# Altium footprint library WE-SHCA.PcbLib: 44 footprints (part 2 of 3)
Each footprint in its own frame and in the unit in brackets; x right, y up, seen from the top. Pads: shape width x height; smd on the part's side, far side on the other; paste and mask are expansions set on the pad; w line width, h text height; cw(c..) or ccw(c..) is an arc to the next point about the centre after c.
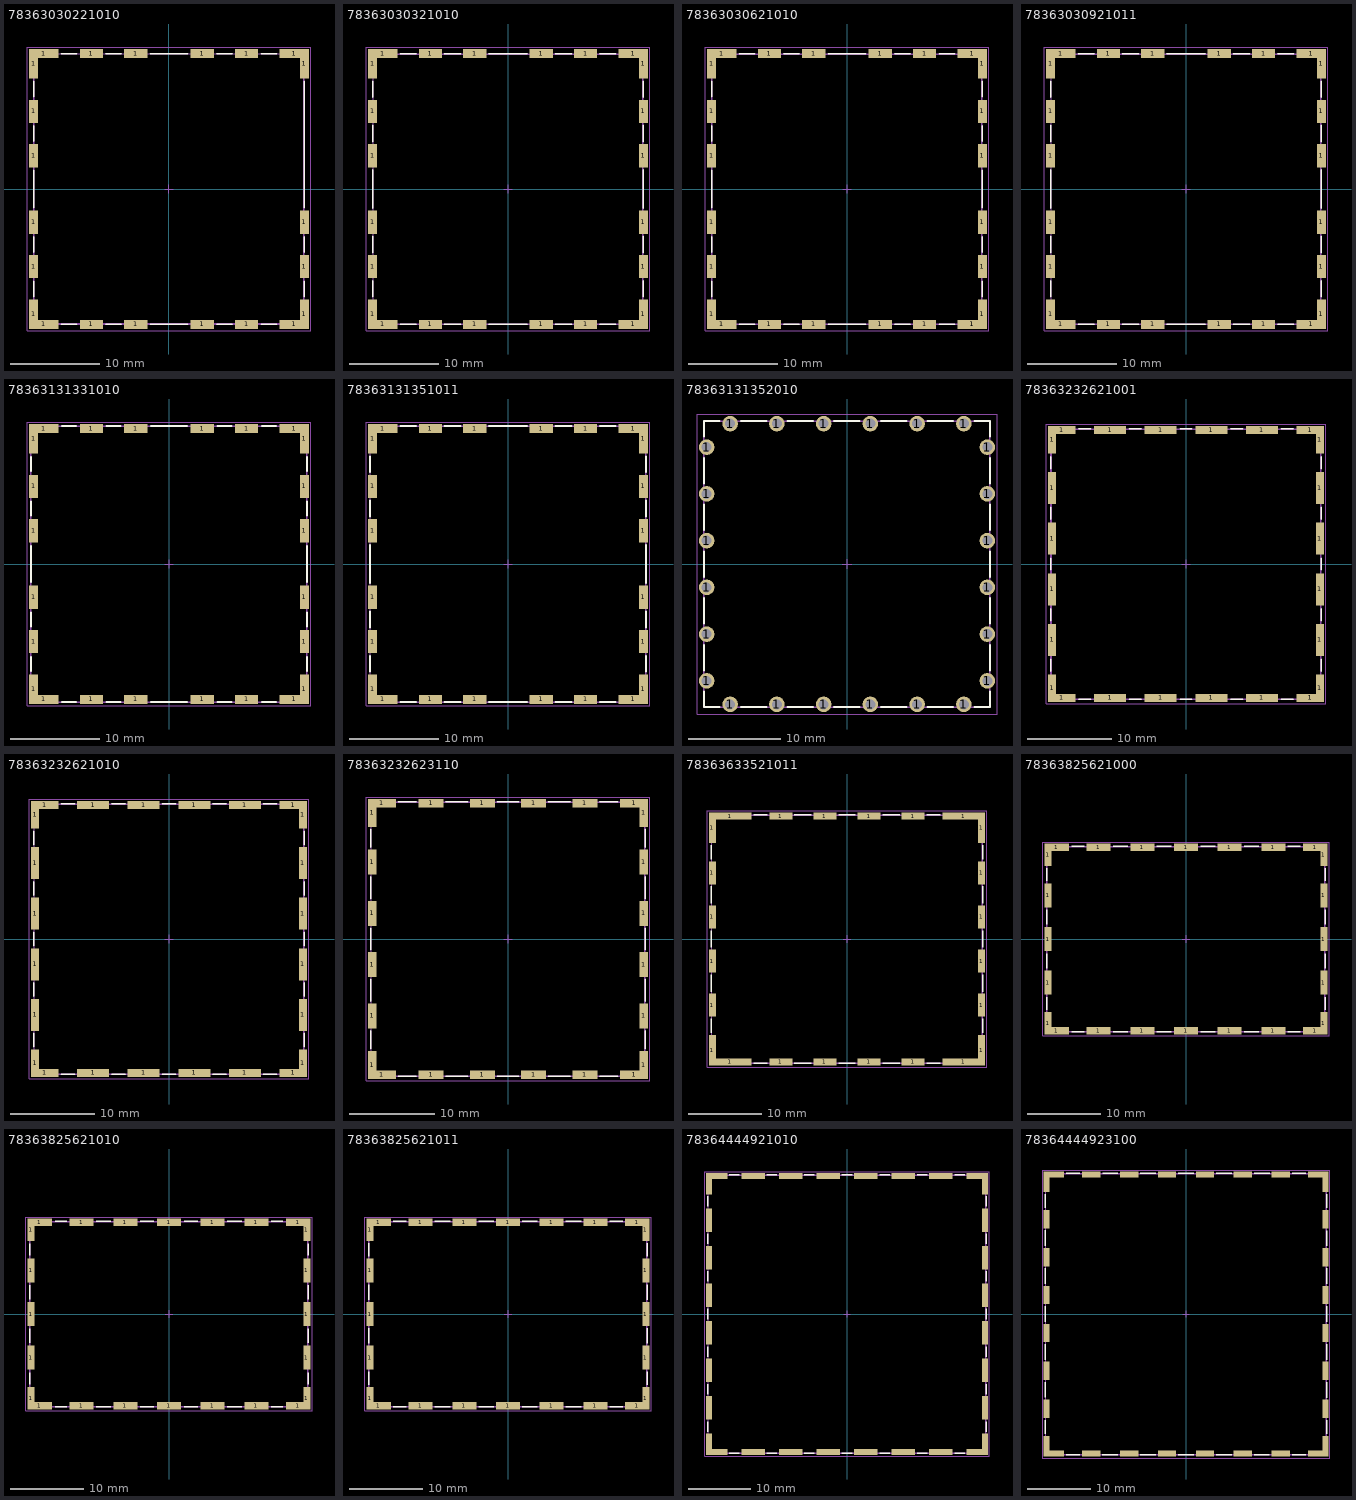
[diagram p1: the footprints below, top view; thin cyan lines are the x and y axes]

## 78363030221010 [mm] "Shielding Cabinet, SMD Frame, body 30.4 x 30.4 mm"
height 2.3
pads (22):
  rect 1x3.3 smd: 1(-15.25,-14.1) 1(-15.25,14.1) 1(15.25,-14.1) 1(15.25,14.1)
  rect 1x2.6 smd: 1(-15.25,-8.75) 1(-15.25,-3.75) 1(-15.25,3.75) 1(-15.25,8.75) 1(15.25,-8.75) 1(15.25,-3.75)
  rect 3.3x1 smd: 1(-14.1,-15.25) 1(-14.1,15.25) 1(14.1,-15.25) 1(14.1,15.25)
  rect 2.6x1 smd: 1(-8.75,-15.25) 1(-8.75,15.25) 1(-3.75,-15.25) 1(-3.75,15.25) 1(3.75,-15.25) 1(3.75,15.25) 1(8.75,-15.25) 1(8.75,15.25)
Top Overlay:
  lines w0.2: -15.25,-12.1 -15.25,-10.4 ; -15.25,-7.1 -15.25,-5.4 ; -15.25,-2.1 -15.25,2.1 ; -15.25,5.4 -15.25,7.1 ; -15.25,10.4 -15.25,12.1 ; -12.1,-15.25 -10.4,-15.25 ; -12.1,15.25 -10.4,15.25 ; -7.1,-15.25 -5.4,-15.25 ; -7.1,15.25 -5.4,15.25 ; -2.1,-15.25 2.1,-15.25 ; -2.1,15.25 2.1,15.25 ; 5.4,-15.25 7.1,-15.25 ; 5.4,15.25 7.1,15.25 ; 10.4,-15.25 12.1,-15.25 ; 10.4,15.25 12.1,15.25 ; 15.25,-12.1 15.25,-10.4 ; 15.25,-7.1 15.25,-5.4 ; 15.25,-2.1 15.25,12.1
Top Assembly:
  lines w0.1: -15.25,-15.25 15.25,-15.25 15.25,15.25 -15.25,15.25 -15.25,-15.25
Top Designator:
  text ".Designator" at -3.647,-0.357 h1
Top 3D Body:
  lines w0.1: -15.2,-15.15 15.2,-15.15 15.2,15.25 -15.2,15.25 -15.2,-15.15
Top Courtyard:
  lines w0.05: -15.95,-15.95 -15.95,15.95 15.95,15.95 15.95,-15.95 -15.95,-15.95
Top Component Center:
  lines w0.1: -0.5,0 0.5,0 ; 0,-0.5 0,0.5
3D body "78363030221010.stp": height 2.32, standoff 0.02, extent -15.2,-15.15 15.2,15.25

## 78363030321010 [mm] "Shielding Cabinet, SMD Frame, 30.4x30.4mm"
height 3.2
pads (24):
  rect 1x3.3 smd: 1(-15.25,-14.1) 1(-15.25,14.1) 1(15.25,-14.1) 1(15.25,14.1)
  rect 1x2.6 smd: 1(-15.25,-8.75) 1(-15.25,-3.75) 1(-15.25,3.75) 1(-15.25,8.75) 1(15.25,-8.75) 1(15.25,-3.75) 1(15.25,3.75) 1(15.25,8.75)
  rect 3.3x1 smd: 1(-14.1,-15.25) 1(-14.1,15.25) 1(14.1,-15.25) 1(14.1,15.25)
  rect 2.6x1 smd: 1(-8.75,-15.25) 1(-8.75,15.25) 1(-3.75,-15.25) 1(-3.75,15.25) 1(3.75,-15.25) 1(3.75,15.25) 1(8.75,-15.25) 1(8.75,15.25)
Top Overlay:
  lines w0.2: -15.25,-12.15 -15.25,-10.35 ; -15.25,-7.15 -15.25,-5.35 ; -15.25,-2.15 -15.25,2.15 ; -15.25,5.35 -15.25,7.15 ; -15.25,10.35 -15.25,12.15 ; -12.15,-15.25 -10.35,-15.25 ; -12.15,15.25 -10.35,15.25 ; -7.15,-15.25 -5.35,-15.25 ; -7.15,15.25 -5.35,15.25 ; -2.15,-15.25 2.15,-15.25 ; -2.15,15.25 2.15,15.25 ; 5.35,-15.25 7.15,-15.25 ; 5.35,15.25 7.15,15.25 ; 10.35,-15.25 12.15,-15.25 ; 10.35,15.25 12.15,15.25 ; 15.25,-12.15 15.25,-10.35 ; 15.25,-7.15 15.25,-5.35 ; 15.25,-2.15 15.25,2.15 ; 15.25,5.35 15.25,7.15 ; 15.25,10.35 15.25,12.15
Top Assembly:
  lines w0.1: -15.25,-15.25 15.25,-15.25 15.25,15.25 -15.25,15.25 -15.25,-15.25
Top Designator:
  text ".Designator" at -3.647,-0.357 h1
Top 3D Body:
  lines w0.1: -15.2,-15.2 -15.2,15.2 15.2,15.2 15.2,-15.2 -15.2,-15.2
Top Courtyard:
  lines w0.05: -15.95,-15.95 15.95,-15.95 15.95,15.95 -15.95,15.95 -15.95,-15.95
Top Component Center:
  lines w0.1: -0.5,0 0.5,0 ; 0,-0.5 0,0.5
3D body "36103305S.stp": height 3.2, standoff 0, extent -15.2,-15.2 15.2,15.2

## 78363030621010 [mm] "Shielding Cabinet, SMD Frame, body 30.4 x 30.4 mm"
height 3.5
pads (26):
  rect 1x3.3 smd: 1(-15.25,-14.1) 1(-15.25,14.1) 1(15.25,-14.1) 1(15.25,14.1)
  rect 1x2.6 smd: 1(-15.25,-8.75) 1(-15.25,-3.75) 1(-15.25,3.75) 1(-15.25,8.75) 1(15.25,-8.75) 1(15.25,-3.75) 1(15.25,3.75) 1(15.25,8.75)
  rect 3.3x1 smd: 1(-14.1,-15.25) 1(-14.1,-15.25) 1(-14.1,15.25) 1(14.1,-15.25) 1(14.1,-15.25) 1(14.1,15.25)
  rect 2.6x1 smd: 1(-8.75,-15.25) 1(-8.75,15.25) 1(-3.75,-15.25) 1(-3.75,15.25) 1(3.75,-15.25) 1(3.75,15.25) 1(8.75,-15.25) 1(8.75,15.25)
Top Overlay:
  lines w0.2: -15.25,-12.1 -15.25,-10.4 ; -15.25,-7.1 -15.25,-5.4 ; -15.25,-2.1 -15.25,2.1 ; -15.25,5.4 -15.25,7.1 ; -15.25,10.4 -15.25,12.1 ; -12.1,-15.25 -10.4,-15.25 ; -12.1,15.25 -10.4,15.25 ; -7.1,-15.25 -5.4,-15.25 ; -7.1,15.25 -5.4,15.25 ; -2.1,-15.25 2.1,-15.25 ; -2.1,15.25 2.1,15.25 ; 5.4,-15.25 7.1,-15.25 ; 5.4,15.25 7.1,15.25 ; 10.4,-15.25 12.1,-15.25 ; 10.4,15.25 12.1,15.25 ; 15.25,-12.1 15.25,-10.4 ; 15.25,-7.1 15.25,-5.4 ; 15.25,-2.1 15.25,2.1 ; 15.25,5.4 15.25,7.1 ; 15.25,10.4 15.25,12.1
Top Assembly:
  lines w0.1: -15.25,-15.25 -15.25,15.25 15.25,15.25 15.25,-15.25 -15.25,-15.25
Top Designator:
  text ".Designator" at -3.647,-0.357 h1
Top 3D Body:
  lines w0.1: -15.2,-15.2 -15.2,15.2 15.2,15.2 15.2,-15.2 -15.2,-15.2
Top Courtyard:
  lines w0.05: -15.95,-15.95 15.95,-15.95 15.95,15.95 -15.95,15.95 -15.95,-15.95
Top Component Center:
  lines w0.1: -0.5,0 0.5,0 ; 0,-0.5 0,0.5
3D body "78363030621010.stp": height 6.02, standoff 0.02, extent -15.2,-15.2 15.2,15.2

## 78363030921011 [mm] "WE-SHC Shielding Cabinet"
height 9.1
pads (24):
  rect 1x3.3 smd: 1(-15.25,-14.1) 1(-15.25,14.1) 1(15.25,-14.1) 1(15.25,14.1)
  rect 1x2.6 smd: 1(-15.25,-8.75) 1(-15.25,-3.75) 1(-15.25,3.75) 1(-15.25,8.75) 1(15.25,-8.75) 1(15.25,-3.75) 1(15.25,3.75) 1(15.25,8.75)
  rect 3.3x1 smd: 1(-14.1,-15.25) 1(-14.1,15.25) 1(14.1,-15.25) 1(14.1,15.25)
  rect 2.6x1 smd: 1(-8.75,-15.25) 1(-8.75,15.25) 1(-3.75,-15.25) 1(-3.75,15.25) 1(3.75,-15.25) 1(3.75,15.25) 1(8.75,-15.25) 1(8.75,15.25)
Top Overlay:
  lines w0.2: -15.25,-12.15 -15.25,-10.35 ; -15.25,-7.15 -15.25,-5.35 ; -15.25,-2.15 -15.25,2.15 ; -15.25,5.35 -15.25,7.15 ; -15.25,10.35 -15.25,12.15 ; -12.15,-15.25 -10.35,-15.25 ; -12.15,15.25 -10.35,15.25 ; -7.15,-15.25 -5.35,-15.25 ; -7.15,15.25 -5.35,15.25 ; -2.15,-15.25 2.15,-15.25 ; -2.15,15.25 2.15,15.25 ; 5.35,-15.25 7.15,-15.25 ; 5.35,15.25 7.15,15.25 ; 10.35,-15.25 12.15,-15.25 ; 10.35,15.25 12.15,15.25 ; 15.25,-12.15 15.25,-10.35 ; 15.25,-7.15 15.25,-5.35 ; 15.25,-2.15 15.25,2.15 ; 15.25,5.35 15.25,7.15 ; 15.25,10.35 15.25,12.15
Top Assembly:
  lines w0.1: -15.25,-15.25 -15.25,15.25 15.25,15.25 15.25,-15.25 -15.25,-15.25
Top Designator:
  text ".Designator" at -3.647,-0.357 h1
Top 3D Body:
  lines w0.1: -15.2,-15.2 15.2,-15.2 15.2,15.2 -15.2,15.2 -15.2,-15.2
Top Courtyard:
  lines w0.05: -15.95,-15.95 -15.95,15.95 15.95,15.95 15.95,-15.95 -15.95,-15.95
Top Component Center:
  lines w0.1: -0.5,0 0.5,0 ; 0,-0.5 0,0.5
3D body "78363030921011.stp": height 9, standoff 0, extent -15.2,-15.2 15.2,15.2

## 78363131331010 [mm] "WE-SHC Shielding Cabinet"
height 3.6
pads (24):
  rect 1x3.3 smd: 1(-15.25,-14.1) 1(-15.25,14.1) 1(15.25,-14.1) 1(15.25,14.1)
  rect 1x2.6 smd: 1(-15.25,-8.75) 1(-15.25,-3.75) 1(-15.25,3.75) 1(-15.25,8.75) 1(15.25,-8.75) 1(15.25,-3.75) 1(15.25,3.75) 1(15.25,8.75)
  rect 3.3x1 smd: 1(-14.1,-15.25) 1(-14.1,15.25) 1(14.1,-15.25) 1(14.1,15.25)
  rect 2.6x1 smd: 1(-8.75,-15.25) 1(-8.75,15.25) 1(-3.75,15.25) 1(-3.75,-15.25) 1(3.75,-15.25) 1(3.75,15.25) 1(8.75,-15.25) 1(8.75,15.25)
Top Overlay:
  lines w0.2: -15.55,-12.05 -15.55,-10.45 ; -15.55,-7.05 -15.55,-5.45 ; -15.55,-2.05 -15.55,2.05 ; -15.55,5.45 -15.55,7.05 ; -15.55,10.45 -15.55,12.05 ; -12.05,-15.55 -10.45,-15.55 ; -12.05,15.55 -10.45,15.55 ; -7.05,-15.55 -5.45,-15.55 ; -7.05,15.55 -5.45,15.55 ; -2.05,-15.55 2.05,-15.55 ; -2.05,15.55 2.05,15.55 ; 5.45,-15.55 7.05,-15.55 ; 5.45,15.55 7.05,15.55 ; 10.45,-15.55 12.05,-15.55 ; 10.45,15.55 12.05,15.55 ; 15.55,-12.05 15.55,-10.45 ; 15.55,-7.05 15.55,-5.45 ; 15.55,-2.05 15.55,2.05 ; 15.55,5.45 15.55,7.05 ; 15.55,10.45 15.55,12.05
Top Assembly:
  lines w0.1: -15.55,-15.55 15.55,-15.55 15.55,15.55 -15.55,15.55 -15.55,-15.55
Top Designator:
  text ".Designator" at -3.647,-0.357 h1
Top 3D Body:
  lines w0.1: -15.5,-15.5 15.5,-15.5 15.5,15.5 -15.5,15.5 -15.5,-15.5
Top Courtyard:
  lines w0.05: -15.95,-15.95 -15.95,15.95 15.95,15.95 15.95,-15.95 -15.95,-15.95
Top Component Center:
  lines w0.1: -0.5,0 0.5,0 ; 0,-0.5 0,0.5
3D body "78363131331010.stp": height 3.5, standoff 0, extent -15.2,-15.2 15.2,15.2

## 78363131351011 [mm] "Shielding Cabinet, SMD Frame, body 31x31mm"
height 3.6
pads (24):
  rect 1x3.3 smd: 1(-15.25,-14.1) 1(-15.25,14.1) 1(15.25,-14.1) 1(15.25,14.1)
  rect 1x2.6 smd: 1(-15.25,-8.75) 1(-15.25,-3.75) 1(-15.25,3.75) 1(-15.25,8.75) 1(15.25,-8.75) 1(15.25,-3.75) 1(15.25,3.75) 1(15.25,8.75)
  rect 3.3x1 smd: 1(-14.1,-15.25) 1(-14.1,15.25) 1(14.1,-15.25) 1(14.1,15.25)
  rect 2.6x1 smd: 1(-8.75,-15.25) 1(-8.75,15.25) 1(-3.75,-15.25) 1(-3.75,15.25) 1(3.75,-15.25) 1(3.75,15.25) 1(8.75,-15.25) 1(8.75,15.25)
Top Overlay:
  lines w0.2: -15.55,-12.15 -15.55,-10.35 ; -15.55,-7.15 -15.55,-5.35 ; -15.55,-2.15 -15.55,2.15 ; -15.55,5.35 -15.55,7.15 ; -15.55,10.35 -15.55,12.15 ; -12.15,-15.55 -10.35,-15.55 ; -12.15,15.55 -10.35,15.55 ; -7.15,-15.55 -5.35,-15.55 ; -7.15,15.55 -5.35,15.55 ; -2.15,-15.55 2.15,-15.55 ; -2.15,15.55 2.15,15.55 ; 5.35,-15.55 7.15,-15.55 ; 5.35,15.55 7.15,15.55 ; 10.35,-15.55 12.15,-15.55 ; 10.35,15.55 12.15,15.55 ; 15.55,-12.15 15.55,-10.35 ; 15.55,-7.15 15.55,-5.35 ; 15.55,-2.15 15.55,2.15 ; 15.55,5.35 15.55,7.15 ; 15.55,10.35 15.55,12.15
Top Assembly:
  lines w0.1: -15.55,-15.55 15.55,-15.55 15.55,15.55 -15.55,15.55 -15.55,-15.55
Top Designator:
  text ".Designator" at -3.647,-0.357 h1
Top 3D Body:
  lines w0.1: -15.5,-15.5 -15.5,15.5 15.5,15.5 15.5,-15.5 -15.5,-15.5
Top Courtyard:
  lines w0.05: -15.95,-15.95 15.95,-15.95 15.95,15.95 -15.95,15.95 -15.95,-15.95
Top Component Center:
  lines w0.1: -0.5,0 0.5,0 ; 0,-0.5 0,0.5
3D body "78363131351011.stp": height 3.5, standoff 0, extent -15.5,-15.5 15.5,15.5

## 78363131352010 [mm] "Shielding Cabinet, SMD Frame, body 31 x 31 mm"
height 3.5
pads (24):
  round 1.7 hole 1.1: 1(-15.25,-12.7) 1(-15.25,-7.62) 1(-15.25,-2.54) 1(-15.25,2.54) 1(-15.25,7.62) 1(-15.25,12.7) 1(-12.7,-15.25) 1(-12.7,15.25) 1(-7.62,-15.25) 1(-7.62,15.25) 1(-2.54,-15.25) 1(-2.54,15.25) 1(2.54,-15.25) 1(2.54,15.25) 1(7.62,-15.25) 1(7.62,15.25) 1(12.7,-15.25) 1(12.7,15.25) 1(15.25,-12.7) 1(15.25,-7.62) 1(15.25,-2.54) 1(15.25,2.54) 1(15.25,7.62) 1(15.25,12.7)
Top Overlay:
  lines w0.2: -15.55,-13.85 -15.55,-15.55 -13.85,-15.55 ; -15.55,-11.57 -15.55,-8.77 ; -15.55,-6.49 -15.55,-3.69 ; -15.55,-1.41 -15.55,1.39 ; -15.55,3.67 -15.55,6.47 ; -15.55,8.75 -15.55,11.55 ; -15.55,13.85 -15.55,15.55 -13.85,15.55 ; -11.55,-15.55 -8.75,-15.55 ; -11.55,15.55 -8.75,15.55 ; -6.49,-15.55 -3.69,-15.55 ; -6.49,15.55 -3.69,15.55 ; -1.41,-15.55 1.39,-15.55 ; -1.41,15.55 1.39,15.55 ; 3.67,-15.55 6.47,-15.55 ; 3.67,15.55 6.47,15.55 ; 8.75,-15.55 11.55,-15.55 ; 8.75,15.55 11.55,15.55 ; 13.85,-15.55 15.55,-15.55 15.55,-13.85 ; 13.85,15.55 15.55,15.55 15.55,13.85 ; 15.55,-11.57 15.55,-8.77 ; 15.55,-6.49 15.55,-3.69 ; 15.55,-1.41 15.55,1.39 ; 15.55,3.67 15.55,6.47 ; 15.55,8.75 15.55,11.55
Top Assembly:
  lines w0.1: -15.55,-15.55 -15.55,15.55 15.55,15.55 15.55,-15.55 -15.55,-15.55
Top Designator:
  text ".Designator" at -3.647,-0.357 h1
Top 3D Body:
  lines w0.1: -15.5,-15.5 -15.5,15.5 15.5,15.5 15.5,-15.5 -15.5,-15.5
Top Courtyard:
  lines w0.05: -16.3,-16.3 -16.3,16.3 16.3,16.3 16.3,-16.3 -16.3,-16.3
Top Component Center:
  lines w0.1: -0.5,0 0.5,0 ; 0,-0.5 0,0.5
3D body "78363131352010.stp": height 3.53, standoff -2.87, extent -15.5,-15.5 15.5,15.5

## 78363232621001 [mm] "Shielding Cabinet, SMD Frame, 30.4x30.4mm"
height 6
pads (24):
  rect 1x3.8 smd: 1(-15.9,-9) 1(-15.9,-3) 1(-15.9,3) 1(-15.9,9) 1(15.9,-9) 1(15.9,-3) 1(15.9,3) 1(15.9,9)
  rect 1x3.3 smd: 1(-15.9,-14.75) 1(-15.9,14.75) 1(15.9,-14.75) 1(15.9,14.75)
  rect 3.3x1 smd: 1(-14.75,-15.9) 1(-14.75,15.9) 1(14.75,-15.9) 1(14.75,15.9)
  rect 3.8x1 smd: 1(-9,-15.9) 1(-9,15.9) 1(-3,-15.9) 1(-3,15.9) 1(3,-15.9) 1(3,15.9) 1(9,-15.9) 1(9,15.9)
Top Overlay:
  lines w0.2: -16.05,-12.7 -16.05,-11.3 ; -16.05,-6.7 -16.05,-5.3 ; -16.05,-0.7 -16.05,0.7 ; -16.05,5.3 -16.05,6.7 ; -16.05,11.3 -16.05,12.7 ; -12.7,-16.05 -11.3,-16.05 ; -12.7,16.05 -11.3,16.05 ; -6.7,-16.05 -5.3,-16.05 ; -6.7,16.05 -5.3,16.05 ; -0.7,-16.05 0.7,-16.05 ; -0.7,16.05 0.7,16.05 ; 5.3,-16.05 6.7,-16.05 ; 5.3,16.05 6.7,16.05 ; 11.3,-16.05 12.7,-16.05 ; 11.3,16.05 12.7,16.05 ; 16.05,-12.7 16.05,-11.3 ; 16.05,-6.7 16.05,-5.3 ; 16.05,-0.7 16.05,0.7 ; 16.05,5.3 16.05,6.7 ; 16.05,11.3 16.05,12.7
Top Assembly:
  lines w0.1: -16.05,-16.05 16.05,-16.05 16.05,16.05 -16.05,16.05 -16.05,-16.05
Top Designator:
  text ".Designator" at -3.647,-0.357 h1
Top 3D Body:
  lines w0.1: -16,-16 -16,16 16,16 16,-16 -16,-16
Top Courtyard:
  lines w0.05: -16.6,-16.6 16.6,-16.6 16.6,16.6 -16.6,16.6 -16.6,-16.6
Top Component Center:
  lines w0.1: -0.5,0 0.5,0 ; 0,-0.5 0,0.5
3D body "78363232621001.stp": height 6, standoff 0, extent -16,-16 16,16

## 78363232621010 [mm] "Shielding Cabinet, SMD Frame, body 32x32mm"
height 6.1
pads (24):
  rect 1x3.3 smd: 1(-15.9,-14.75) 1(-15.9,14.75) 1(15.9,-14.75) 1(15.9,14.75)
  rect 1x3.8 smd: 1(-15.9,-9) 1(-15.9,-3) 1(-15.9,3) 1(-15.9,9) 1(15.9,-9) 1(15.9,-3) 1(15.9,3) 1(15.9,9)
  rect 3.3x1 smd: 1(-14.75,-15.9) 1(-14.75,15.9) 1(14.75,-15.9) 1(14.75,15.9)
  rect 3.8x1 smd: 1(-9,-15.9) 1(-9,15.9) 1(-3,-15.9) 1(-3,15.9) 1(3,-15.9) 1(3,15.9) 1(9,-15.9) 1(9,15.9)
Top Overlay:
  lines w0.2: -16.05,-12.8 -16.05,-11.2 ; -16.05,-6.8 -16.05,-5.2 ; -16.05,-0.8 -16.05,0.8 ; -16.05,5.2 -16.05,6.8 ; -16.05,11.2 -16.05,12.8 ; -12.8,-16.05 -11.2,-16.05 ; -12.8,16.05 -11.2,16.05 ; -6.8,-16.05 -5.2,-16.05 ; -6.8,16.05 -5.2,16.05 ; -0.8,-16.05 0.8,-16.05 ; -0.8,16.05 0.8,16.05 ; 5.2,-16.05 6.8,-16.05 ; 5.2,16.05 6.8,16.05 ; 11.2,-16.05 12.8,-16.05 ; 11.2,16.05 12.8,16.05 ; 16.05,-12.8 16.05,-11.2 ; 16.05,-6.8 16.05,-5.2 ; 16.05,-0.8 16.05,0.8 ; 16.05,5.2 16.05,6.8 ; 16.05,11.2 16.05,12.8
Top Assembly:
  lines w0.1: -16.05,-16.05 16.05,-16.05 16.05,16.05 -16.05,16.05 -16.05,-16.05
Top Designator:
  text ".Designator" at -3.647,-0.357 h1
Top 3D Body:
  lines w0.1: -16,-16 -16,16 16,16 16,-16 -16,-16
Top Courtyard:
  lines w0.05: -16.6,-16.6 16.6,-16.6 16.6,16.6 -16.6,16.6 -16.6,-16.6
Top Component Center:
  lines w0.1: -0.5,0 0.5,0 ; 0,-0.5 0,0.5
3D body "36106326S.stp": height 6, standoff 0, extent -16,-16 16,16

## 78363232623110 [mm] "Shielding Cabinet, body 32x32mm"
height 6
pads (24):
  rect 1x2.9 smd: 1(-15.9,-9) 1(-15.9,-3) 1(-15.9,3) 1(-15.9,9) 1(15.9,-9) 1(15.9,-3) 1(15.9,3) 1(15.9,9)
  rect 1x3.3 smd: 1(-15.9,-14.75) 1(-15.9,14.75) 1(15.9,-14.75) 1(15.9,14.75)
  rect 3.3x1 smd: 1(-14.75,-15.9) 1(-14.75,15.9) 1(14.75,-15.9) 1(14.75,15.9)
  rect 2.9x1 smd: 1(-9,-15.9) 1(-9,15.9) 1(-3,-15.9) 1(-3,15.9) 1(3,-15.9) 1(3,15.9) 1(9,-15.9) 1(9,15.9)
Top Overlay:
  lines w0.2: -16.05,-12.8 -16.05,-10.75 ; -16.05,-7.25 -16.05,-4.75 ; -16.05,-1.25 -16.05,1.25 ; -16.05,4.75 -16.05,7.25 ; -16.05,10.75 -16.05,12.8 ; -12.8,-16.05 -10.75,-16.05 ; -12.8,16.05 -10.75,16.05 ; -7.25,-16.05 -4.75,-16.05 ; -7.25,16.05 -4.75,16.05 ; -1.25,-16.05 1.25,-16.05 ; -1.25,16.05 1.25,16.05 ; 4.75,-16.05 7.25,-16.05 ; 4.75,16.05 7.25,16.05 ; 10.75,-16.05 12.8,-16.05 ; 10.75,16.05 12.8,16.05 ; 16.05,-12.8 16.05,-10.75 ; 16.05,-7.25 16.05,-4.75 ; 16.05,-1.25 16.05,1.25 ; 16.05,4.75 16.05,7.25 ; 16.05,10.75 16.05,12.8
Top Assembly:
  lines w0.1: -16.05,-16.05 16.05,-16.05 16.05,16.05 -16.05,16.05 -16.05,-16.05
Top Designator:
  text ".Designator" at -3.647,-0.357 h1
Top 3D Body:
  lines w0.1: -16,-16 -16,16 16,16 16,-16 -16,-16
Top Courtyard:
  lines w0.05: -16.6,-16.6 16.6,-16.6 16.6,16.6 -16.6,16.6 -16.6,-16.6
Top Component Center:
  lines w0.1: -0.5,0 0.5,0 ; 0,-0.5 0,0.5
3D body "36906326S.stp": height 6, standoff 0, extent -16,-16 16,16

## 78363633521011 [mm] "Shielding Cabinet, SMD Frame, 36.83x33.68mm"
height 5.08
pads (24):
  rect 1x4.2 smd: 1(-18.315,-15.14) 1(-18.315,15.14) 1(18.315,-15.14) 1(18.315,15.14)
  rect 1x3.1 smd: 1(-18.315,-9) 1(-18.315,-3) 1(-18.315,3) 1(-18.315,9) 1(18.315,-9) 1(18.315,-3) 1(18.315,3) 1(18.315,9)
  rect 5.8x1 smd: 1(-15.915,-16.74) 1(-15.915,16.74) 1(15.915,-16.74) 1(15.915,16.74)
  rect 3.1x1 smd: 1(-9,-16.74) 1(-9,16.74) 1(-3,-16.74) 1(-3,16.74) 1(3,-16.74) 1(3,16.74) 1(9,-16.74) 1(9,16.74)
Top Overlay:
  lines w0.2: -18.465,-12.75 -18.465,-10.85 ; -18.465,-7.15 -18.465,-4.85 ; -18.465,-1.15 -18.465,1.15 ; -18.465,4.85 -18.465,7.15 ; -18.465,10.85 -18.465,12.75 ; -12.7,-16.89 -10.85,-16.89 ; -12.7,16.89 -10.85,16.89 ; -7.15,-16.89 -4.85,-16.89 ; -7.15,16.89 -4.85,16.89 ; -1.15,-16.89 1.15,-16.89 ; -1.15,16.89 1.15,16.89 ; 4.85,-16.89 7.15,-16.89 ; 4.85,16.89 7.15,16.89 ; 10.85,-16.89 12.7,-16.89 ; 10.85,16.89 12.7,16.89 ; 18.465,-12.75 18.465,-10.85 ; 18.465,-7.15 18.465,-4.85 ; 18.465,-1.15 18.465,1.15 ; 18.465,4.85 18.465,7.15 ; 18.465,10.85 18.465,12.75
Top Assembly:
  lines w0.1: -18.465,-16.89 18.465,-16.89 18.465,16.89 -18.465,16.89 -18.465,-16.89
Top Designator:
  text ".Designator" at -3.647,-0.357 h1
Top 3D Body:
  lines w0.1: -18.415,-16.84 -18.415,16.84 18.415,16.84 18.415,-16.84 -18.415,-16.84
Top Courtyard:
  lines w0.05: -19.015,-17.44 19.015,-17.44 19.015,17.44 -19.015,17.44 -19.015,-17.44
Top Component Center:
  lines w0.1: -0.5,0 0.5,0 ; 0,-0.5 0,0.5
3D body "3610536336S.stp": height 5.1, standoff 0.02, extent -18.415,-16.84 18.415,16.84

## 78363825621000 [mm] "Shielding Cabinet, SMD Frame, body 38.1 x 25.4 mm"
height 6
pads (24):
  rect 1x3.05 smd: 1(-18.95,-11.575) 1(-18.95,11.575) 1(18.95,-11.575) 1(18.95,11.575)
  rect 1x3.3 smd: 1(-18.95,-6) 1(-18.95,0) 1(-18.95,6) 1(18.95,-6) 1(18.95,0) 1(18.95,6)
  rect 3.4x1 smd: 1(-17.75,-12.6) 1(-17.75,12.6) 1(17.75,-12.6) 1(17.75,12.6)
  rect 3.3x1 smd: 1(-12,-12.6) 1(-12,12.6) 1(-6,-12.6) 1(-6,12.6) 1(0,-12.6) 1(0,12.6) 1(6,-12.6) 1(6,12.6) 1(12,-12.6) 1(12,12.6)
Top Overlay:
  lines w0.2: -19.1,-9.7 -19.1,-8 ; -19.1,-4 -19.1,-2 ; -19.1,2 -19.1,4 ; -19.1,8 -19.1,9.7 ; -15.7,-12.75 -14,-12.75 ; -15.7,12.75 -14,12.75 ; -10,-12.75 -8,-12.75 ; -10,12.75 -8,12.75 ; -4,-12.75 -2,-12.75 ; -4,12.75 -2,12.75 ; 2,-12.75 4,-12.75 ; 2,12.75 4,12.75 ; 8,-12.75 10,-12.75 ; 8,12.75 10,12.75 ; 14,-12.75 15.7,-12.75 ; 14,12.75 15.7,12.75 ; 19.1,-9.7 19.1,-8 ; 19.1,-4 19.1,-2 ; 19.1,2 19.1,4 ; 19.1,8 19.1,9.7
Top Assembly:
  lines w0.1: -19.1,-12.75 -19.1,12.75 19.1,12.75 19.1,-12.75 -19.1,-12.75
Top Designator:
  text ".Designator" at -3.647,-0.357 h1
Top 3D Body:
  lines w0.1: -19.05,-12.7 -19.05,12.7 19.05,12.7 19.05,-12.7 -19.05,-12.7
Top Courtyard:
  lines w0.05: -19.65,-13.3 -19.65,13.3 19.65,13.3 19.65,-13.3 -19.65,-13.3
Top Component Center:
  lines w0.1: -0.5,0 0.5,0 ; 0,-0.5 0,0.5
3D body "78363825621000.stp": height 6.02, standoff 0.02, extent -19.05,-12.7 19.05,12.7

## 78363825621010 [mm] "WE-SHC Shielding Cabinet"
height 6
pads (24):
  rect 1x3.05 smd: 1(-18.95,-11.575) 1(-18.95,11.575) 1(18.95,-11.575) 1(18.95,11.575)
  rect 1x3.3 smd: 1(-18.95,-6) 1(-18.95,0) 1(-18.95,6) 1(18.95,-6) 1(18.95,0) 1(18.95,6)
  rect 3.4x1 smd: 1(-17.75,-12.6) 1(-17.75,12.6) 1(17.75,-12.6) 1(17.75,12.6)
  rect 3.3x1 smd: 1(-12,-12.6) 1(-12,12.6) 1(-6,-12.6) 1(-6,12.6) 1(0,-12.6) 1(0,12.6) 1(6,-12.6) 1(6,12.6) 1(12,-12.6) 1(12,12.6)
Top Overlay:
  lines w0.2: -19.1,-9.65 -19.1,-8.05 ; -19.1,-3.95 -19.1,-2.05 ; -19.1,2.05 -19.1,3.95 ; -19.1,8.05 -19.1,9.65 ; -15.65,-12.75 -14.05,-12.75 ; -15.65,12.75 -14.05,12.75 ; -10,-12.75 -8,-12.75 ; -10,12.75 -8,12.75 ; -3.944,12.75 -2.088,12.75 ; -3.934,-12.75 -2.088,-12.75 ; 2.088,-12.75 3.944,-12.75 ; 2.088,12.75 3.934,12.75 ; 8,-12.75 10,-12.75 ; 8,12.75 10,12.75 ; 14.05,-12.75 15.65,-12.75 ; 14.05,12.75 15.65,12.75 ; 19.1,-9.65 19.1,-8.05 ; 19.1,-3.95 19.1,-2.05 ; 19.1,2.05 19.1,3.95 ; 19.1,8.05 19.1,9.65
Top Assembly:
  lines w0.1: -19.1,-12.75 -19.1,12.75 19.1,12.75 19.1,-12.75 -19.1,-12.75
Top Designator:
  text ".Designator" at -3.647,-0.357 h1
Top 3D Body:
  lines w0.1: -19.05,-12.7 19.05,-12.7 19.05,12.7 -19.05,12.7 -19.05,-12.7
Top Courtyard:
  lines w0.05: -19.65,-13.3 19.65,-13.3 19.65,13.3 -19.65,13.3 -19.65,-13.3
Top Component Center:
  lines w0.1: -0.5,0 0.5,0 ; 0,-0.5 0,0.5
3D body "78363825621010.stp": height 6, standoff 0, extent -19.05,-12.7 19.05,12.7

## 78363825621011 [mm] "Shielding Cabinet, SMD Frame, 38.1x25.4mm"
height 6
pads (24):
  rect 1x3.05 smd: 1(-18.95,-11.575) 1(-18.95,11.575) 1(18.95,-11.575) 1(18.95,11.575)
  rect 1x3.3 smd: 1(-18.95,-6) 1(-18.95,0) 1(-18.95,6) 1(18.95,-6) 1(18.95,0) 1(18.95,6)
  rect 3.4x1 smd: 1(-17.75,-12.6) 1(-17.75,12.6) 1(17.75,-12.6) 1(17.75,12.6)
  rect 3.3x1 smd: 1(-12,-12.6) 1(-12,12.6) 1(-6,-12.6) 1(-6,12.6) 1(0,-12.6) 1(0,12.6) 1(6,-12.6) 1(6,12.6) 1(12,-12.6) 1(12,12.6)
Top Overlay:
  lines w0.2: -19.1,-9.75 -19.1,-7.95 ; -19.1,-4.05 -19.1,-1.95 ; -19.1,1.95 -19.1,4.05 ; -19.1,7.95 -19.1,9.75 ; -15.75,-12.75 -13.95,-12.75 ; -15.75,12.75 -13.95,12.75 ; -10.05,-12.75 -7.95,-12.75 ; -10.05,12.75 -7.95,12.75 ; -4.05,-12.75 -1.95,-12.75 ; -4.05,12.75 -1.95,12.75 ; 1.95,-12.75 4.05,-12.75 ; 1.95,12.75 4.05,12.75 ; 7.95,-12.75 10.05,-12.75 ; 7.95,12.75 10.05,12.75 ; 13.95,-12.75 15.75,-12.75 ; 13.95,12.75 15.75,12.75 ; 19.1,-9.75 19.1,-7.95 ; 19.1,-4.05 19.1,-1.95 ; 19.1,1.95 19.1,4.05 ; 19.1,7.95 19.1,9.75
Top Assembly:
  lines w0.1: -19.1,-12.75 19.1,-12.75 19.1,12.75 -19.1,12.75 -19.1,-12.75
Top Designator:
  text ".Designator" at -3.647,-0.357 h1
Top 3D Body:
  lines w0.1: -19.05,-12.7 -19.05,12.7 19.05,12.7 19.05,-12.7 -19.05,-12.7
Top Courtyard:
  lines w0.05: -19.65,-13.3 19.65,-13.3 19.65,13.3 -19.65,13.3 -19.65,-13.3
Top Component Center:
  lines w0.1: -0.5,0 0.5,0 ; 0,-0.5 0,0.5
3D body "78363825621011.stp": height 6, standoff 0, extent -19.05,-12.7 19.05,12.7

## 78364444921010 [mm] "Shielding Cabinet, SMD Frame, body 44.37x44.37mm"
height 9.85
pads (32):
  rect 1x3.48 smd: 1(-22.085,-20.845) 1(-22.085,20.845) 1(22.085,-20.845) 1(22.085,20.845)
  rect 1x3.8 smd: 1(-22.085,-15) 1(-22.085,-9) 1(-22.085,-3) 1(-22.085,3) 1(-22.085,9) 1(-22.085,15) 1(22.085,-15) 1(22.085,-9) 1(22.085,-3) 1(22.085,3) 1(22.085,9) 1(22.085,15)
  rect 3.48x1 smd: 1(-20.845,-22.085) 1(-20.845,22.085) 1(20.845,-22.085) 1(20.845,22.085)
  rect 3.8x1 smd: 1(-15,-22.085) 1(-15,22.085) 1(-9,-22.085) 1(-9,22.085) 1(-3,-22.085) 1(-3,22.085) 1(3,-22.085) 1(3,22.085) 1(9,-22.085) 1(9,22.085) 1(15,-22.085) 1(15,22.085)
Top Overlay:
  lines w0.2: -22.235,-18.8 -22.235,-17.2 ; -22.235,-12.8 -22.235,-11.2 ; -22.235,-6.8 -22.235,-5.2 ; -22.235,-0.8 -22.235,0.8 ; -22.235,5.2 -22.235,6.8 ; -22.235,11.2 -22.235,12.8 ; -22.235,17.2 -22.235,18.8 ; -18.8,-22.235 -17.2,-22.235 ; -18.8,22.235 -17.2,22.235 ; -12.8,-22.235 -11.2,-22.235 ; -12.8,22.235 -11.2,22.235 ; -6.8,-22.235 -5.2,-22.235 ; -6.8,22.235 -5.2,22.235 ; -0.8,-22.235 0.8,-22.235 ; -0.8,22.235 0.8,22.235 ; 5.2,-22.235 6.8,-22.235 ; 5.2,22.235 6.8,22.235 ; 11.2,-22.235 12.8,-22.235 ; 11.2,22.235 12.8,22.235 ; 17.2,-22.235 18.8,-22.235 ; 17.2,22.235 18.8,22.235 ; 22.235,-18.8 22.235,-17.2 ; 22.235,-12.8 22.235,-11.2 ; 22.235,-6.8 22.235,-5.2 ; 22.235,-0.8 22.235,0.8 ; 22.235,5.2 22.235,6.8 ; 22.235,11.2 22.235,12.8 ; 22.235,17.2 22.235,18.8
Top Assembly:
  lines w0.1: -22.235,-22.235 -22.235,22.235 22.235,22.235 22.235,-22.235 -22.235,-22.235
Top Designator:
  text ".Designator" at -3.647,-0.357 h1
Top 3D Body:
  lines w0.1: -22.185,-22.185 22.185,-22.185 22.185,22.185 -22.185,22.185 -22.185,-22.185
Top Courtyard:
  lines w0.05: -22.785,-22.785 -22.785,22.785 22.785,22.785 22.785,-22.785 -22.785,-22.785
Top Component Center:
  lines w0.1: -0.5,0 0.5,0 ; 0,-0.5 0,0.5
3D body "78364444921010.stp": height 9.75, standoff 0, extent -22.185,-22.185 22.185,22.185

## 78364444923100 [mm] "Shielding Cabinet, SMD Frame, body 44.37x44.37mm"
height 9.75
pads (32):
  rect 1x3.3 smd: 1(-22.08,-20.93) 1(-22.08,20.93) 1(22.08,-20.93) 1(22.08,20.93)
  rect 1x2.9 smd: 1(-22.08,-15) 1(-22.08,-9) 1(-22.08,-3) 1(-22.08,3) 1(-22.08,9) 1(-22.08,15) 1(22.08,-15) 1(22.08,-9) 1(22.08,-3) 1(22.08,3) 1(22.08,9) 1(22.08,15)
  rect 3.3x1 smd: 1(-20.93,-22.08) 1(-20.93,22.08) 1(20.93,-22.08) 1(20.93,22.08)
  rect 2.9x1 smd: 1(-15,-22.08) 1(-15,22.08) 1(-9,-22.08) 1(-9,22.08) 1(-3,-22.08) 1(-3,22.08) 1(3,-22.08) 1(3,22.08) 1(9,-22.08) 1(9,22.08) 1(15,-22.08) 1(15,22.08)
Top Overlay:
  lines w0.2: -22.235,-18.93 -22.235,-16.78 ; -22.235,-13.2 -22.235,-10.78 ; -22.235,-7.2 -22.235,-4.78 ; -22.235,-1.2 -22.235,1.22 ; -22.235,4.8 -22.235,7.22 ; -22.235,10.8 -22.235,13.22 ; -22.235,16.8 -22.235,18.95 ; -18.95,-22.235 -16.8,-22.235 ; -18.93,22.235 -16.78,22.235 ; -13.22,-22.235 -10.8,-22.235 ; -13.2,22.235 -10.78,22.235 ; -7.22,-22.235 -4.8,-22.235 ; -7.2,22.235 -4.78,22.235 ; -1.22,-22.235 1.2,-22.235 ; -1.2,22.235 1.22,22.235 ; 4.78,-22.235 7.2,-22.235 ; 4.8,22.235 7.22,22.235 ; 10.78,-22.235 13.2,-22.235 ; 10.8,22.235 13.22,22.235 ; 16.78,-22.235 18.93,-22.235 ; 16.8,22.235 18.95,22.235 ; 22.235,-18.95 22.235,-16.8 ; 22.235,-13.22 22.235,-10.8 ; 22.235,-7.22 22.235,-4.8 ; 22.235,-1.22 22.235,1.2 ; 22.235,4.78 22.235,7.2 ; 22.235,10.78 22.235,13.2 ; 22.235,16.78 22.235,18.93
Top Assembly:
  lines w0.1: -22.235,-22.235 22.235,-22.235 22.235,22.235 -22.235,22.235 -22.235,-22.235
Top Designator:
  text ".Designator" at -3.647,-0.362 h1
Top 3D Body:
  lines w0.1: -22.185,-22.185 -22.185,22.185 22.185,22.185 22.185,-22.185 -22.185,-22.185
Top Courtyard:
  lines w0.05: -22.78,-22.79 22.78,-22.79 22.78,22.78 -22.78,22.78 -22.78,-22.79
Top Component Center:
  lines w0.1: -0.5,-0.005 0.5,-0.005 ; 0,-0.505 0,0.495
3D body "78364444923100.stp": height 9.75, standoff 0, extent -22.185,-22.19 22.185,22.18